# Altium footprint library FootPrintLib_3.PcbLib: 198 footprints (part 6 of 13)
Each footprint in its own frame and in the unit in brackets; x right, y up, seen from the top. Pads: shape width x height; smd on the part's side, far side on the other; paste and mask are expansions set on the pad; w line width, h text height; cw(c..) or ccw(c..) is an arc to the next point about the centre after c.
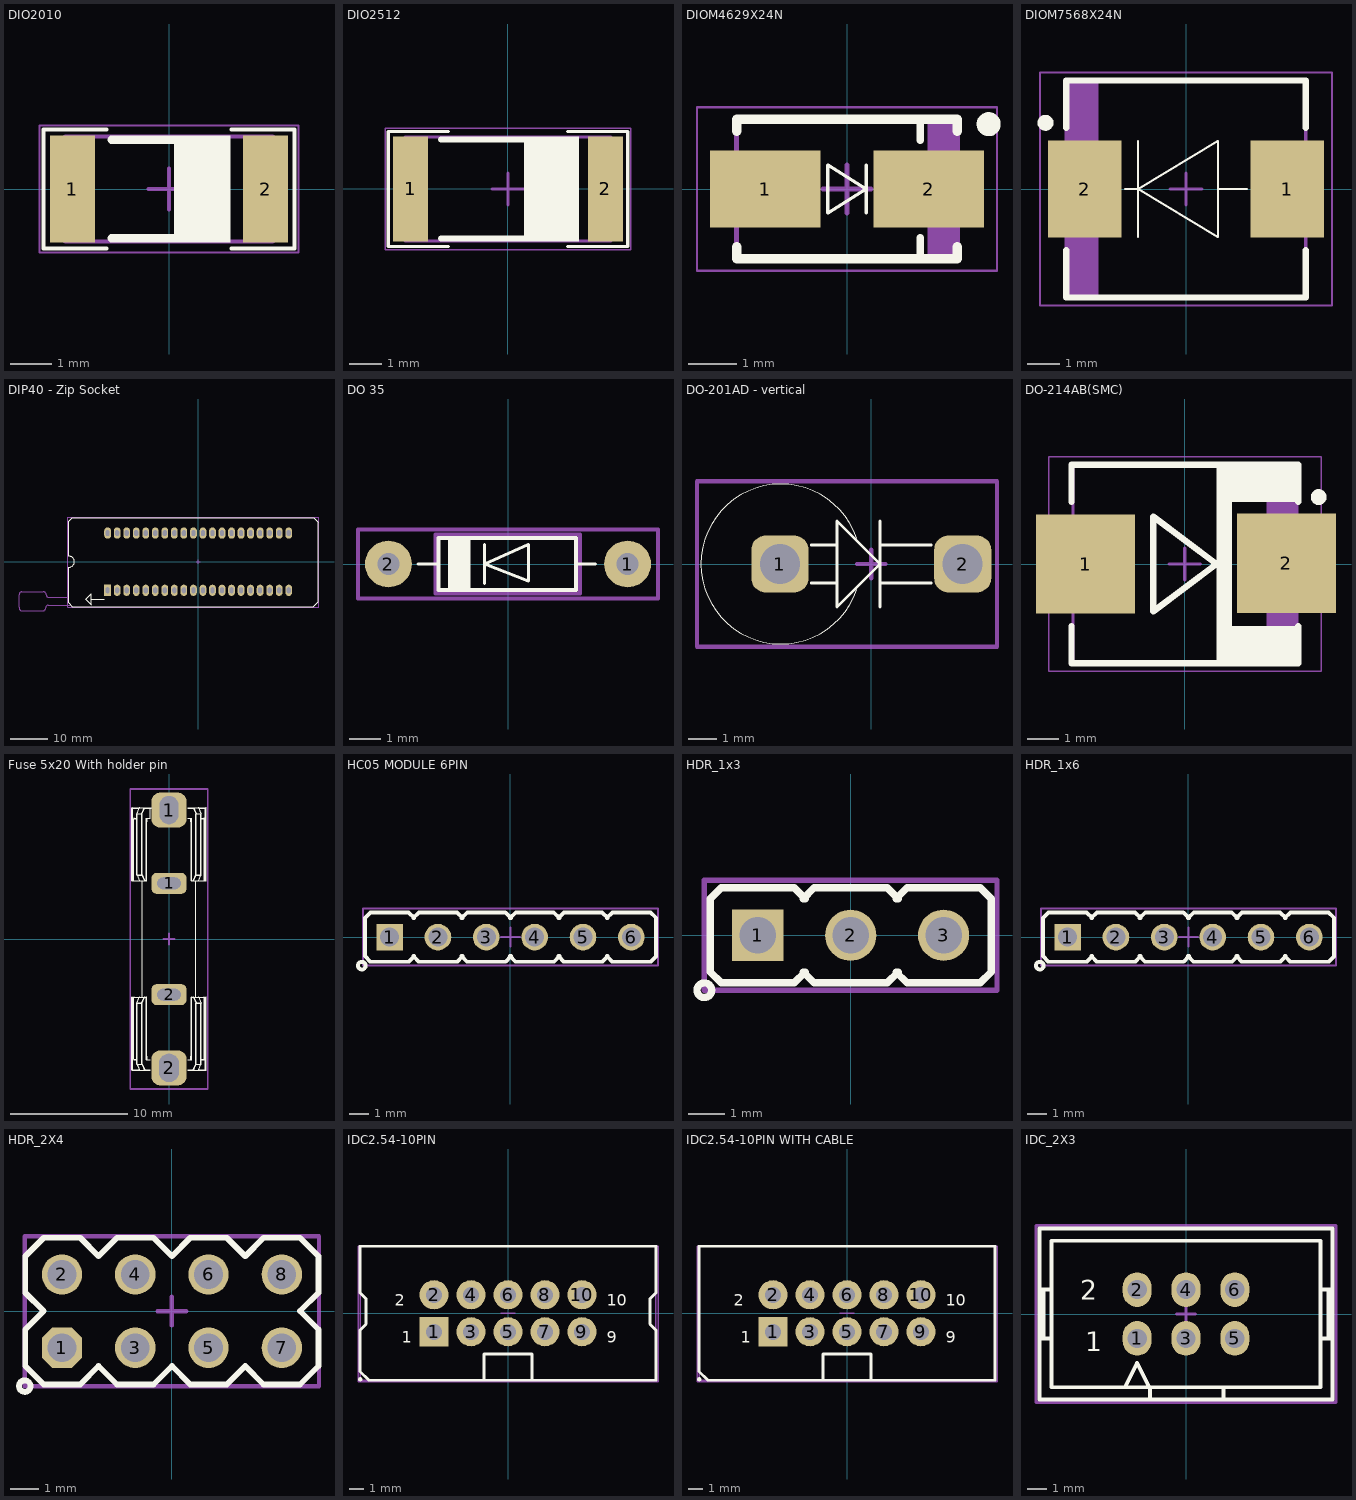
[diagram p5: the footprints below, top view; thin cyan lines are the x and y axes]

## DIO2010 [mm] "Chip Diode, 2-Leads, Body 5/00x2/50mm, IPC Medium Density DESIGNER:ABBAS BASEREH"
height 0.55
pads (2):
  rect 1.1x2.6 smd: 1(-2.35,0) 2(2.35,0)
Top Overlay:
  rectangle: 0.125,-1.3 1.5,1.3
  lines w0.1: -1.525,-1.45 -3.05,-1.45 -3.05,1.45 -1.525,1.45 ; 1.525,-1.45 3.05,-1.45 3.05,1.45 1.525,1.45
  lines w0.2: -1.4,-1.2 1.4,-1.2 ; -1.4,1.2 1.4,1.2
Mechanical 13:
  lines w0.1: -2.525,-1.275 2.525,-1.275 2.525,1.275 -2.525,1.275 -2.525,-1.275
Mechanical 15:
  lines w0.05: -3.15,-1.55 3.15,-1.55 3.15,1.55 -3.15,1.55 -3.15,-1.55
  lines w0.1: -0.5,0 0.5,0 ; 0,-0.5 0,0.5
3D body "DIO2010.step": height 0.55, standoff 0, extent -2.525,-1.275 2.525,1.275

## DIO2512 [mm] "Chip Diode, 2-Leads, Body 6/40x3/20mm, IPC Medium Density DESIGNER:ABBAS BASEREH"
height 0.7
pads (2):
  rect 1.1x3.3 smd: 1(-3.05,0) 2(3.05,0)
Top Overlay:
  rectangle: 0.5,-1.65 2.225,1.65
  lines w0.1: -1.875,-1.8 -3.75,-1.8 -3.75,1.8 -1.875,1.8 ; 1.875,-1.8 3.75,-1.8 3.75,1.8 1.875,1.8
  lines w0.2: -2.1,-1.55 2.1,-1.55 ; -2.1,1.55 2.1,1.55
Mechanical 13:
  lines w0.1: -3.225,-1.625 -3.225,1.625 3.225,1.625 3.225,-1.625 -3.225,-1.625
Mechanical 15:
  lines w0.05: -3.85,-1.9 -3.85,1.9 3.85,1.9 3.85,-1.9 -3.85,-1.9
  lines w0.1: -0.5,0 0.5,0 ; 0,-0.5 0,0.5
3D body "DIO2512.step": height 0.7, standoff 0, extent -3.225,-1.625 3.225,1.625

## DIOM4629X24N [mm] "Molded Diode, 2-Leads, Body 4/60x2/90mm, IPC Medium Density-Design:Abbas Basereh"
height 2.43
pads (2):
  rect 2.3x1.6 smd: 1(-1.7,0) 2(1.7,0)
Top Overlay:
  circle w0.25: c2.95,1.35 r0.125
  lines w0.07: 0.4,-0.5 0.4,0.5 ; -0.4,-0.5 0.4,0 -0.4,0.5 -0.4,-0.5
  lines w0.15: 1.524,-1.45 1.524,-1.016 ; 1.524,1.016 1.524,1.397
  lines w0.2: -2.3,-1.2 -2.3,-1.45 2.3,-1.45 2.3,-1.2 ; -2.3,1.2 -2.3,1.45 2.3,1.45 2.3,1.2
Mechanical 13:
  rectangle: 1.681,-1.45 2.3,1.45
  lines w0.1: -2.3,-1.45 2.3,-1.45 2.3,1.45 -2.3,1.45 -2.3,-1.45
Mechanical 15:
  lines w0.05: -3.125,-1.7 3.125,-1.7 3.125,1.7 -3.125,1.7 -3.125,-1.7
  lines w0.1: -0.5,0 0.5,0 ; 0,-0.5 0,0.5
3D body "User Library-DO-214AC_SMA.STEP": height 2.2, standoff 0, extent -2.5,-1.223 2.5,1.477

## DIOM7568X24N [mm] "Molded Diode, 2-Leads, Body 7/50x6/80mm, IPC Medium Density-Design:Abbas Basereh"
height 2.4
pads (2):
  rect 2.3x3.05 smd: 1(3.175,0) 2(-3.175,0)
Top Overlay:
  circle w0.25: c-4.4,2.075 r0.125
  lines w0.07: -1.9,0 -1.5,0 ; -1.5,-1.5 -1.5,1.5 ; 1,0 1.9,0 ; -1.5,0 1,-1.5 1,1.5 -1.5,0
  lines w0.2: -3.75,-1.925 -3.75,-3.4 3.75,-3.4 3.75,-1.925 ; -3.75,1.925 -3.75,3.4 3.75,3.4 3.75,1.925
Mechanical 13:
  rectangle: -3.75,-3.4 -2.741,3.4
  lines w0.1: -3.75,-3.4 3.75,-3.4 3.75,3.4 -3.75,3.4 -3.75,-3.4
Mechanical 15:
  lines w0.05: -4.575,-3.65 4.575,-3.65 4.575,3.65 -4.575,3.65 -4.575,-3.65
  lines w0.1: -0.5,0 0.5,0 ; 0,-0.5 0,0.5
3D body "SW3DPS-SMC-DEFAULT.STEP": height 2.8, standoff 0, extent -3.808,-3.172 3.81,3.048

## DIP40 - Zip Socket [mm] "40 Pin Zip Socket DESIGNER : ABBAS BASEREH"
height 12
pads (40):
  rect 1.8x3 hole 1 slot 1.5 at 90 deg mask+0.06: 1(-24.13,-7.62)
  oval 1.8x3 hole 1 slot 1.5 at 90 deg mask+0.06: 2(-21.59,-7.62) 3(-19.05,-7.62) 4(-16.51,-7.62) 5(-13.97,-7.62) 6(-11.43,-7.62) 7(-8.89,-7.62) 8(-6.35,-7.62) 9(-3.81,-7.62) 10(-1.27,-7.62) 11(1.27,-7.62) 12(3.81,-7.62) 13(6.35,-7.62) 14(8.89,-7.62) 15(11.43,-7.62) 16(13.97,-7.62) 17(16.51,-7.62) 18(19.05,-7.62) 19(21.59,-7.62) 20(24.13,-7.62) 21(24.13,7.62) 22(21.59,7.62) 23(19.05,7.62) 24(16.51,7.62) 25(13.97,7.62) 26(11.43,7.62) 27(8.89,7.62) 28(6.35,7.62) 29(3.81,7.62) 30(1.27,7.62) 31(-1.27,7.62) 32(-3.81,7.62) 33(-6.35,7.62) 34(-8.89,7.62) 35(-11.43,7.62) 36(-13.97,7.62) 37(-16.51,7.62) 38(-19.05,7.62) 39(-21.59,7.62) 40(-24.13,7.62)
Top Overlay:
  lines w0.2: -28.5,-10 -25,-10 ; -34.5,-10.992 -33.492,-12 30.722,-12 32,-10.722 32,10.508 30.808,11.7 -33.578,11.7 -34.5,10.778 -34.5,1.5 cw(c-34.5,0) -34.5,-1.5 -34.5,-10.992 ; -30,-10 -28.5,-8.5 -28.5,-11.5 -30,-10
Mechanical 13:
  lines w0.2: -34.5,-9.5 -39.795,-9.5 cw(c-39.795,-8.808) -40.488,-8.808 ccw(c-41.269,-8.808) -41.269,-8.026 -46.965,-8.026 ccw(c-46.965,-8.808) -47.746,-8.808 -47.746,-12.198 ccw(c-46.812,-12.198) -46.812,-13.132 -41.478,-13.132 ccw(c-41.478,-12.243) -40.589,-12.243 cw(c-39.903,-12.243) -39.903,-11.557 -34.135,-11.557
Mechanical 15:
  lines w0.2: -0.5,0 0.5,0 ; 0,-0.5 0,0.5 ; -34.7,-12.2 32.2,-12.2 32.2,11.9 -34.7,11.9 -34.7,-12.2
3D body "Zif-Zip Socket.STEP": height 21.95, standoff -2.53, extent -41.579,-12.975 31.475,11.501

## DO 35 [mm] "Diode"
height 1.6
pads (2):
  round 1.5 hole 0.7: 1(3.825,0) 2(-3.825,0)
Top Overlay:
  rectangle: -1.925,-0.85 -1.2,0.85
  lines w0.1: -2.875,0 -2.225,0 ; -0.75,-0.625 -0.75,0.625 ; 2.175,0 2.8,0 ; -0.75,0 0.65,0.625 0.65,-0.55 -0.75,0
  lines w0.127: -2.225,-0.825 2.175,-0.825 2.175,0.825 -2.225,0.825 -2.225,-0.825
Mechanical 13:
  lines w0.127: -2.325,-0.95 -2.325,0.95 2.3,0.95 2.3,-0.95 -2.325,-0.95
Mechanical 15:
  lines w0.127: -4.8,-1.1 4.8,-1.1 4.8,1.1 -4.8,1.1 -4.8,-1.1
3D body "User Library-DO-35-300mil.STEP": height 2.46, standoff -1.95, extent -4.1,-0.96 4.08,0.96

## DO-201AD - vertical [mm] "Designer Abbas Basereh"
height 12
pads (2):
  rrect50% 2x2 hole 1.4: 1(-3.2,0) 2(3.2,0)
Top Overlay:
  lines w0.013: -3.164,-0.66 cw(c-3.164,0) -3.164,0.66 ; -3.163,-0.658 cw(c-3.166,0) -3.164,0.658 ; -0.511,-0.896 cw(c-3.164,0) -0.511,0.896 ; 3.266,-0.66 ccw(c3.266,0) 3.926,0 ccw(c3.266,0) 3.266,0.66 ; 3.266,-0.658 ccw(c3.269,0) 3.266,0.658
  lines w0.1: -2.1,-0.66 -1.2,-0.66 ; -2.1,0.66 -1.2,0.66 ; 0.3,-1.5 0.3,1.5 ; 0.3,-0.66 2.1,-0.66 ; 0.3,0.66 2.1,0.66 ; -1.2,-1.5 -1.2,1.5 0.3,0 -1.2,-1.5
Mechanical 15:
  lines w0.15: -0.5,0 0.5,0 ; 0,-0.5 0,0.5 ; -6.1,-2.9 -6.1,2.9 4.4,2.9 4.4,-2.9 -6.1,-2.9
3D body "User Library-User Library-DO-201AV-Vertical_2001.STEP": height 15.69, standoff -3, extent -6.045,-2.8 3.845,2.8

## DO-214AB(SMC) [mm] "Molded Diode, 2-Leads, Body 6/85x5/90mm, IPC Medium Density DESIGNER ABBAS BASEREH"
height 2.62
pads (2):
  rect 3.15x3.15 smd: 1(-3.15,0) 2(3.225,0.025)
Top Overlay:
  circle w0.25: c4.25,2.125 r0.125
  rectangle: 1,-2 1.5,1.975
  rectangle: 1,-3.2 3.6,-1.975
  rectangle: 1,1.975 3.6,3.15
  lines w0.2: -3.6,-1.975 -3.6,-3.15 3.6,-3.15 3.6,-1.975 ; -3.6,1.975 -3.6,3.15 3.6,3.15 3.6,1.975 ; -1,-1.5 1,0 -1,1.5 -1,-1.5
Mechanical 13:
  rectangle: 2.599,-3.11 3.555,3.11
  lines w0.1: -3.555,-3.11 3.555,-3.11 3.555,3.11 -3.555,3.11 -3.555,-3.11
Mechanical 15:
  lines w0.05: -4.325,-3.4 4.325,-3.4 4.325,3.4 -4.325,3.4 -4.325,-3.4
  lines w0.1: -0.5,0 0.5,0 ; 0,-0.5 0,0.5
3D body "DO-214AB(SMC).step": height 2.62, standoff 0, extent -3.775,-3.11 3.775,3.11

## Fuse 5x20 With holder pin [mm] "Dsigner : Abbas Basereh"
height 8
pads (4):
  rrect50% 3x1.8 hole 1 slot 2 at 0 deg: 1(0,4.75) 2(0,-4.75)
  rrect50% 3x3 hole 1.6 slot 2.4 at 90 deg: 1(0,11)
  rrect50% 3x3 hole 1.7 slot 2.4 at 90 deg: 2(0,-11)
Top Overlay:
  drawing of 353 lines, arcs and shapes, not listed
Mechanical 15:
  lines w0.15: -0.5,0 0.5,0 ; 0,-0.5 0,0.5 ; -3.3,-12.8 3.3,-12.8 3.3,12.8 -3.3,12.8 -3.3,-12.8
3D body "User Library-Clips FC-201 with fuse 5x20.STEP": height 8.63, standoff -3.56, extent -3.173,-11.689 3.174,11.689

## HC05 MODULE 6PIN [mm] "HC05 box-Designer Abbas Basereh"
height 40
pads (6):
  rect 1.4x1.4 / inner rect 1.4x1.4 / far side rect 1.4x2.2 hole 1 mask+0.1: 1(-6.35,0)
  round 1.4 / inner round 1.4 / far side oval 1.4x2.2 hole 1 mask+0.1: 2(-3.81,0) 3(-1.27,0) 4(1.27,0) 5(3.81,0) 6(6.35,0)
Top Overlay:
  circle w0.2: c-7.81,-1.5 r0.2
  lines w0.2: -5.11,-1 -4.81,-1.3 -2.81,-1.3 -2.51,-1 ; -5.11,1 -4.81,1.3 -2.81,1.3 -2.51,1 ; -5.05,-1 -5.35,-1.3 -7.35,-1.3 -7.65,-1 -7.65,1 -7.35,1.3 -5.35,1.3 -5.05,1 ; -2.57,-1 -2.27,-1.3 -0.27,-1.3 0.03,-1 ; -2.57,1 -2.27,1.3 -0.27,1.3 0.03,1 ; -0.025,-1 0.275,-1.3 2.275,-1.3 2.575,-1 ; -0.025,1 0.275,1.3 2.275,1.3 2.575,1 ; 2.515,-1 2.815,-1.3 4.815,-1.3 5.115,-1 ; 2.515,1 2.815,1.3 4.815,1.3 5.115,1 ; 5.055,-1 5.355,-1.3 7.355,-1.3 7.64,-1.015 7.64,1.015 7.355,1.3 5.355,1.3 5.055,1
Mechanical 15:
  lines w0.1: -0.5,0 0.5,0 ; 0,-0.5 0,0.5 ; -7.75,-1.5 -7.75,1.5 7.75,1.5 7.75,-1.5 -7.75,-1.5
3D body "User Library-hc05.STEP": height 40, standoff -2.6, extent -8.025,-0.5 8.075,5.4

## HDR_1x3 [mm] "Header /Jumper box-Designer Abbas Basereh"
height 7.62
pads (3):
  rect 1.4x1.4 / inner rect 1.4x1.4 / far side rect 1.4x2.2 hole 1 mask+0.1: 1(-2.54,0)
  round 1.4 / inner round 1.4 / far side oval 1.4x2.2 hole 1 mask+0.1: 2(0,0) 3(2.54,0)
Top Overlay:
  circle w0.2: c-4,-1.5 r0.2
  lines w0.2: -1.3,-1 -1,-1.3 1,-1.3 1.3,-1 ; -1.3,1 -1,1.3 1,1.3 1.3,1 ; -1.24,-1 -1.54,-1.3 -3.54,-1.3 -3.84,-1 -3.84,1 -3.54,1.3 -1.54,1.3 -1.24,1 ; 1.24,-1 1.54,-1.3 3.54,-1.3 3.84,-1 3.84,1 3.54,1.3 1.54,1.3 1.24,1
Mechanical 15:
  lines w0.15: -4,-1.5 -4,1.5 4,1.5 4,-1.5 -4,-1.5
3D body "User Library-PinHeaderX3.STEP": height 8.61, standoff -3.58, extent -3.82,-1.46 3.8,1.46

## HDR_1x6 [mm] "Header /Jumper box-Designer Abbas Basereh"
height 7.62
pads (6):
  rect 1.4x1.4 / inner rect 1.4x1.4 / far side rect 1.4x2.2 hole 1 mask+0.1: 1(-6.35,0)
  round 1.4 / inner round 1.4 / far side oval 1.4x2.2 hole 1 mask+0.1: 2(-3.81,0) 3(-1.27,0) 4(1.27,0) 5(3.81,0) 6(6.35,0)
Top Overlay:
  circle w0.2: c-7.81,-1.5 r0.2
  lines w0.2: -5.11,-1 -4.81,-1.3 -2.81,-1.3 -2.51,-1 ; -5.11,1 -4.81,1.3 -2.81,1.3 -2.51,1 ; -5.05,-1 -5.35,-1.3 -7.35,-1.3 -7.65,-1 -7.65,1 -7.35,1.3 -5.35,1.3 -5.05,1 ; -2.57,-1 -2.27,-1.3 -0.27,-1.3 0.03,-1 ; -2.57,1 -2.27,1.3 -0.27,1.3 0.03,1 ; -0.025,-1 0.275,-1.3 2.275,-1.3 2.575,-1 ; -0.025,1 0.275,1.3 2.275,1.3 2.575,1 ; 2.515,-1 2.815,-1.3 4.815,-1.3 5.115,-1 ; 2.515,1 2.815,1.3 4.815,1.3 5.115,1 ; 5.055,-1 5.355,-1.3 7.355,-1.3 7.64,-1.015 7.64,1.015 7.355,1.3 5.355,1.3 5.055,1
Mechanical 15:
  lines w0.1: -0.5,0 0.5,0 ; 0,-0.5 0,0.5 ; -7.75,-1.5 -7.75,1.5 7.75,1.5 7.75,-1.5 -7.75,-1.5
3D body "User Library-PinHeaderX3.STEP": height 8.61, standoff -3.58, extent -0.01,-1.46 7.61,1.46
3D body "User Library-PinHeaderX3.STEP": height 8.61, standoff -3.58, extent -7.63,-1.46 -0.01,1.46

## HDR_2X4 [mm] "Designer:Abbas Basereh"
height 7.62
pads (8):
  oct 1.4x1.4 / inner oct 1.4x1.4 / far side oct 1.4x2.2 hole 1 mask+0.1: 1(-3.81,-1.27)
  round 1.4 / inner round 1.4 / far side oval 1.4x2.2 hole 1 mask+0.1: 2(-3.81,1.27) 3(-1.27,-1.27) 4(-1.27,1.27) 5(1.27,-1.27) 6(1.27,1.27) 7(3.81,-1.27) 8(3.81,1.27)
Top Overlay:
  circle w0.2: c-5.1,-2.6 r0.2
  lines w0.2: -5.08,-1.905 -4.445,-2.54 -3.175,-2.54 -2.54,-1.905 -1.905,-2.54 -0.635,-2.54 0,-1.905 0.635,-2.54 1.905,-2.54 2.54,-1.905 3.175,-2.54 4.445,-2.54 5.08,-1.905 5.08,-0.635 4.445,0 5.08,0.635 5.08,1.905 4.445,2.54 3.175,2.54 2.54,1.905 1.905,2.54 0.635,2.54 0,1.905 -0.635,2.54 -1.905,2.54 -2.54,1.905 -3.175,2.54 -4.445,2.54 -5.08,1.905 -5.08,0.635 -4.445,0 -5.08,-0.635 -5.08,-1.905
Mechanical 15:
  lines w0.15: -0.5,0 0.5,0 ; 0,-0.5 0,0.5 ; -5.1,-2.6 -5.1,2.6 5.1,2.6 5.1,-2.6 -5.1,-2.6
3D body "User Library-Header_Male_4Pin.STEP": height 8.54, standoff -3, extent -5.08,-2.49 5.08,0
3D body "User Library-Header_Male_4Pin.STEP": height 8.54, standoff -3, extent -5.08,0 5.08,2.49

## IDC2.54-10PIN [mm] "Connector; IDC, Low Profile Male Header, Thru-Hole; 10 Position; Vertical; Pitch 2.54 mm; 20.32 x 9.2 x 9.45 mm (LxWxH) DESIGNER : ABBAS BASEREH"
height 9.45
pads (10):
  rect 2x2 hole 1.1: 1(-5.08,-1.27)
  round 2 hole 1.1: 2(-5.08,1.27) 3(-2.54,-1.27) 4(-2.54,1.27) 5(0,-1.27) 6(0,1.27) 7(2.54,-1.27) 8(2.54,1.27) 9(5.08,-1.27) 10(5.08,1.27)
Top Overlay:
  lines w0.2: -1.65,-4.6 -1.65,-2.8 1.65,-2.8 1.65,-4.6 ; -1.65,-4.6 1.65,-4.6 ; -1.65,-4.6 -9.55,-4.6 -10.16,-3.99 -10.16,-1.16 -9.75,-0.75 -9.75,1 -10.16,1.41 -10.16,4.6 10.16,4.6 10.16,1.41 9.75,1 9.75,-0.75 10.16,-1.16 10.16,-4.6 1.65,-4.6
  lines w0.3: -10.15,-4.55 -10.15,-4.525
  text "9" at 6.788,-2.02 h0.8
  text "10" at 6.788,0.52 h0.8
  text "1" at -7.288,-2.02 h0.8
  text "2" at -7.788,0.52 h0.8
Mechanical 13:
  lines w0.1: -10.16,-4.6 -10.16,4.6 10.16,4.6 10.16,-4.6 -10.16,-4.6
Mechanical 15:
  lines w0.1: -0.5,0 0.5,0 ; -10.3,-4.7 10.3,-4.7 10.3,4.6 -10.3,4.6 -10.3,-4.7
3D body "User Library-IDC Socket Male 10pin Straight THT Goldplated 2_54mm.STEP": height 9.17, standoff -3.23, extent -10.15,-4.25 10.15,4.6

## IDC2.54-10PIN WITH CABLE [mm] "Connector; IDC, Low Profile Male Header, Thru-Hole; 10 Position; Vertical; Pitch 2.54 mm; 20.32 x 9.2 x 9.45 mm (LxWxH) DESIGNER : ABBAS BASEREH"
height 9.45
pads (10):
  rect 2x2 hole 1.1: 1(-5.08,-1.27)
  round 2 hole 1.1: 2(-5.08,1.27) 3(-2.54,-1.27) 4(-2.54,1.27) 5(0,-1.27) 6(0,1.27) 7(2.54,-1.27) 8(2.54,1.27) 9(5.08,-1.27) 10(5.08,1.27)
Top Overlay:
  lines w0.2: -1.65,-4.6 -1.65,-2.8 1.65,-2.8 1.65,-4.6 ; -1.65,-4.6 1.65,-4.6 ; -1.65,-4.6 -9.55,-4.6 -10.16,-3.99 -10.16,4.6 10.16,4.6 10.16,-4.6 1.65,-4.6
  lines w0.3: -10.15,-4.55 -10.15,-4.525
  text "9" at 6.788,-2.02 h0.8
  text "10" at 6.788,0.52 h0.8
  text "1" at -7.288,-2.02 h0.8
  text "2" at -7.788,0.52 h0.8
Mechanical 13:
  lines w0.1: -10.16,-4.6 -10.16,4.6 10.16,4.6 10.16,-4.6 -10.16,-4.6
Mechanical 15:
  lines w0.1: -0.5,0 0.5,0 ; -10.3,-4.7 10.3,-4.7 10.3,4.6 -10.3,4.6 -10.3,-4.7
3D body "header_awhw10g-0202-t.STEP": height 9, standoff -3.5, extent -10.15,-4.4 10.17,4.4

## IDC_2X3 [mm] "IDC2X3 FOR PROGPIN AND JUMPER BOX AND ETC. DESIGNER ABBAS BASEREH"
height 7.62
pads (6):
  oval 1.5x1.8 hole 1 mask+0.1: 1(-2.54,-1.27) 2(-2.54,1.27) 3(0,-1.27) 4(0,1.27) 5(2.54,-1.27) 6(2.54,1.27)
Top Overlay:
  lines w0.2: -7.62,-1.27 -6.985,-1.27 ; -7.62,1.27 -6.985,1.27 ; -7.408,-1.27 -7.408,1.27 ; -3.175,-3.81 -2.54,-2.54 -1.905,-3.81 ; -1.865,-4.445 -1.865,-3.81 ; 1.945,-4.445 1.945,-3.81 ; 6.985,-1.27 7.62,-1.27 ; 6.985,1.27 7.62,1.27 ; 7.408,-1.27 7.408,1.27 ; -7.62,-4.445 -7.62,4.445 7.62,4.445 7.62,-4.445 -7.62,-4.445 ; -6.985,-3.81 -6.985,3.81 6.985,3.81 6.985,-3.81 -6.985,-3.81
  text "1" at -5.232,-1.93 h1
  text "2" at -5.512,0.737 h1
Mechanical 15:
  lines w0.15: -0.5,0 0.5,0 ; 0,-0.5 0,0.5 ; -7.8,-4.6 -7.8,4.6 7.8,4.6 7.8,-4.6 -7.8,-4.6
3D body "User Library-IDC Socket Male 6pin Straight THT Goldplated 2_54mm.STEP": height 9.17, standoff -3.23, extent -7.61,-4.25 7.61,4.6